# Altium footprint library 1.31-LED发光二极管.PcbLib: 48 footprints (part 3 of 3)
Each footprint in its own frame and in the unit in brackets; x right, y up, seen from the top. Pads: shape width x height; smd on the part's side, far side on the other; paste and mask are expansions set on the pad; w line width, h text height; cw(c..) or ccw(c..) is an arc to the next point about the centre after c.
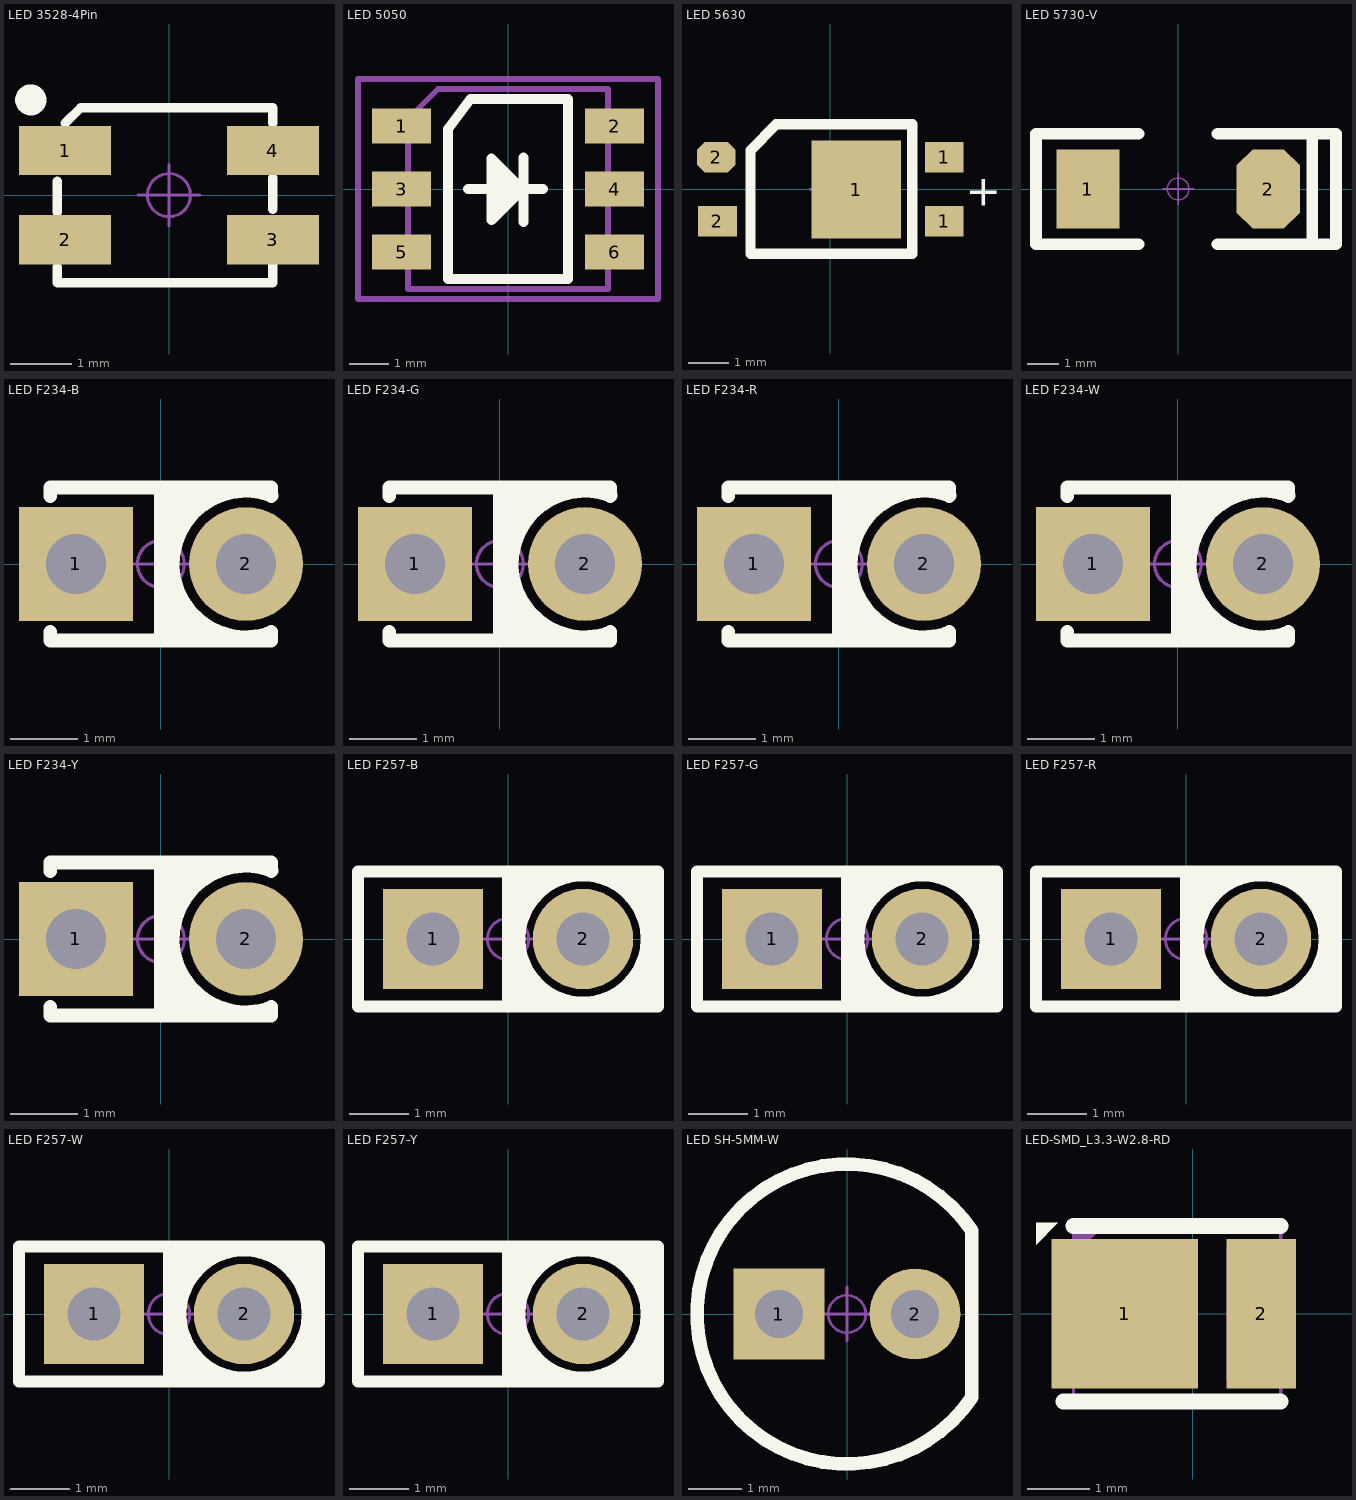
[diagram p2: the footprints below, top view; thin cyan lines are the x and y axes]

## LED 3528-4Pin [mm] "4脚，3528LED                             淘宝ID:黄晶宝石"
pads (4):
  rect 1.5x0.8 smd: 1(-1.689,0.725) 2(-1.689,-0.725) 3(1.689,-0.725) 4(1.689,0.725)
Top Overlay:
  circle w0.254: c-2.248,1.549 r0.127
  lines w0.152: -1.816,-1.168 -1.816,-1.422 1.689,-1.422 1.689,-1.118 ; -1.816,-0.279 -1.816,0.229 ; -1.689,1.168 -1.435,1.422 1.689,1.422 1.689,1.168 ; 1.689,-0.229 1.689,0.279
Mechanical 15:
  circle w0.05: c0,0 r0.35
  lines w0.05: -0.5,0 0.5,0 ; 0,-0.5 0,0.5
3D body "LED 3528 透明胶.ST": height 1.95, standoff 1.2, extent -1.195,-1.195 1.195,1.195
3D body "LED 3528-4Pin 基体.STEP": height 1.95, standoff 0.05, extent -1.75,-1.4 1.75,1.4

## LED 5050 [mm] "白色5050LED                                           淘宝ID:黄晶宝石"
pads (6):
  rect 1.5x0.9 smd: 1(-2.705,1.6) 2(2.705,1.6) 3(-2.705,0) 4(2.705,0) 5(-2.705,-1.6) 6(2.705,-1.6)
Top Overlay:
  lines w0.254: -1.016,0 0.889,0 ; -0.254,0.559 -0.229,-0.432 0.254,0 0,0.254 0,0 0,-0.254 ; 0.356,-0.02 -0.417,-0.792 -0.417,0.775 0.396,-0.038 ; 0.396,-0.841 0.396,0.805 ; -1.524,-2.286 1.524,-2.286 1.524,2.286 -0.953,2.286 -1.524,1.524 -1.524,-2.286
Mechanical 13:
  lines w0.15: -2.54,-2.54 2.54,-2.54 2.54,2.54 -1.778,2.54 -2.54,1.778 -2.54,-2.54
Mechanical 15:
  circle w0.05: c0,0 r0.35
  lines w0.05: -0.5,0 0.5,0 ; 0,-0.5 0,0.5
  lines w0.15: -3.81,-2.794 3.81,-2.794 3.81,2.794 -3.81,2.794 -3.81,-2.794
3D body "LED 5050 基体.STEP": height 1.65, standoff 0.05, extent -2.7,-2.5 2.7,2.5
3D body "LED 5050 透明胶.STEP": height 1.65, standoff 0.77, extent -1.995,-1.995 1.995,1.995

## LED 5630 [mm] "白色5630LED                            淘宝ID:黄晶宝石"
pads (5):
  rect 2.2x2.4 smd: 1(0.635,-0.006)
  rect 0.95x0.75 smd: 1(2.794,-0.781) 1(2.794,0.781) 2(-2.769,-0.781)
  oct 0.95x0.75 smd: 2(-2.794,0.781)
Top Overlay:
  lines w0.254: -1.956,-1.581 2.007,-1.581 2.007,1.594 -1.321,1.594 -1.956,0.959 -1.956,-1.581
  text "+" at 3.327,-0.4 h0.76
Mechanical 15:
  circle w0.05: c0,0 r0.35
  lines w0.05: -0.5,0 0.5,0 ; 0,-0.5 0,0.5
3D body "LED 5630 基体.STEP": height 0.95, standoff 0.05, extent -2.9,-1.5 2.9,1.5
3D body "LED 5630 透明胶.STEP": height 0.95, standoff 0.6, extent -2.395,-1.395 2.395,1.395

## LED 5730-V [mm] "紫色5730LED                               淘宝ID:黄晶宝石"
pads (2):
  rect 2.032x2.54 smd: 1(-2.9,0)
  oct 2.032x2.54 smd: 2(2.9,0)
Top Overlay:
  lines w0.381: -1.27,-1.778 -4.572,-1.778 -4.572,1.778 -1.27,1.778 ; 1.27,-1.778 4.318,-1.778 ; 1.27,1.778 4.318,1.778 4.318,-1.778 ; 4.191,1.778 5.08,1.778 5.08,-1.778 4.318,-1.778
Mechanical 15:
  circle w0.05: c0,0 r0.35
  lines w0.05: -0.5,0 0.5,0 ; 0,-0.5 0,0.5
3D body "LED_UV5730.STEP": height 0.85, standoff 0, extent -2.85,-1.5 2.85,1.5

## LED F234-B [mm] "蓝色2mm*3mm*4mm(长*宽*高)       淘宝ID:黄晶宝石"
pads (2):
  rect 1.7x1.7 hole 0.9: 1(-1.27,0)
  round 1.7 hole 0.9: 2(1.27,0)
Top Overlay:
  lines w0.203: -1.651,-1.016 -1.651,-1.143 1.651,-1.143 1.651,-1.016 ; -1.651,1.016 -1.651,1.143 1.651,1.143 1.651,1.016 ; 0,-1.143 0,1.143 ; 0,-0.889 0.254,-1.143 ; 0,-0.635 0.508,-1.143 ; 0,-0.381 0.762,-1.143 ; 0,0.381 0.762,1.143 ; 0,0.635 0.508,1.143 ; 0,0.889 0.254,1.143 ; 0.127,-0.635 0.127,0.508 ; 1.584,-1.046 cw(c1.27,0) 1.654,1.023
Mechanical 15:
  circle w0.05: c0,0 r0.35
  lines w0.05: -0.5,0 0.5,0 ; 0,-0.5 0,0.5
3D body "LED F234透明罩.STEP": height 4.05, standoff 0.05, extent -1.5,-1 1.5,1
3D body "LED F234-B.STEP": height 3.01, standoff -3.45, extent -1.52,-0.838 1.52,0.838

## LED F234-G [mm] "绿色2mm*3mm*4mm(长*宽*高)           淘宝ID:黄晶宝石"
pads (2):
  rect 1.7x1.7 hole 0.9: 1(-1.27,0)
  round 1.7 hole 0.9: 2(1.27,0)
Top Overlay:
  lines w0.203: -1.651,-1.016 -1.651,-1.143 1.651,-1.143 1.651,-1.016 ; -1.651,1.016 -1.651,1.143 1.651,1.143 1.651,1.016 ; 0,-1.143 0,1.143 ; 0,-0.889 0.254,-1.143 ; 0,-0.635 0.508,-1.143 ; 0,-0.381 0.762,-1.143 ; 0,0.381 0.762,1.143 ; 0,0.635 0.508,1.143 ; 0,0.889 0.254,1.143 ; 0.127,-0.635 0.127,0.508 ; 1.584,-1.046 cw(c1.27,0) 1.654,1.023
Mechanical 15:
  circle w0.05: c0,0 r0.35
  lines w0.05: -0.5,0 0.5,0 ; 0,-0.5 0,0.5
3D body "LED F234透明罩.STEP": height 4.05, standoff 0.05, extent -1.5,-1 1.5,1
3D body "LED F234-G.STEP": height 3.01, standoff -3.45, extent -1.52,-0.838 1.52,0.838

## LED F234-R [mm] "红色2mm*3mm*4mm(长*宽*高)              淘宝ID:黄晶宝石"
pads (2):
  rect 1.7x1.7 hole 0.9: 1(-1.27,0)
  round 1.7 hole 0.9: 2(1.27,0)
Top Overlay:
  lines w0.203: -1.651,-1.016 -1.651,-1.143 1.651,-1.143 1.651,-1.016 ; -1.651,1.016 -1.651,1.143 1.651,1.143 1.651,1.016 ; 0,-1.143 0,1.143 ; 0,-0.889 0.254,-1.143 ; 0,-0.635 0.508,-1.143 ; 0,-0.381 0.762,-1.143 ; 0,0.381 0.762,1.143 ; 0,0.635 0.508,1.143 ; 0,0.889 0.254,1.143 ; 0.127,-0.635 0.127,0.508 ; 1.584,-1.046 cw(c1.27,0) 1.654,1.023
Mechanical 15:
  circle w0.05: c0,0 r0.35
  lines w0.05: -0.5,0 0.5,0 ; 0,-0.5 0,0.5
3D body "LED F234-R.STEP": height 3.01, standoff -3.45, extent -1.52,-0.838 1.52,0.839
3D body "LED F234透明罩.STEP": height 4.05, standoff 0.05, extent -1.5,-1 1.5,1

## LED F234-W [mm] "透明色2mm*3mm*4mm(长*宽*高)              淘宝ID:黄晶宝石"
pads (2):
  rect 1.7x1.7 hole 0.9: 1(-1.27,0)
  round 1.7 hole 0.9: 2(1.27,0)
Top Overlay:
  lines w0.203: -1.651,-1.016 -1.651,-1.143 1.651,-1.143 1.651,-1.016 ; -1.651,1.016 -1.651,1.143 1.651,1.143 1.651,1.016 ; 0,-1.143 0,1.143 ; 0,-0.889 0.254,-1.143 ; 0,-0.635 0.508,-1.143 ; 0,-0.381 0.762,-1.143 ; 0,0.381 0.762,1.143 ; 0,0.635 0.508,1.143 ; 0,0.889 0.254,1.143 ; 0.127,-0.635 0.127,0.508 ; 1.584,-1.046 cw(c1.27,0) 1.654,1.023
Mechanical 15:
  circle w0.05: c0,0 r0.35
  lines w0.05: -0.5,0 0.5,0 ; 0,-0.5 0,0.5
3D body "LED F234-W.STEP": height 3.01, standoff -3.45, extent -1.52,-0.838 1.52,0.838
3D body "LED F234透明罩.STEP": height 4.05, standoff 0.05, extent -1.5,-1 1.5,1

## LED F234-Y [mm] "黄色2mm*3mm*4mm(长*宽*高)                 淘宝ID:黄晶宝石"
pads (2):
  rect 1.7x1.7 hole 0.9: 1(-1.27,0)
  round 1.7 hole 0.9: 2(1.27,0)
Top Overlay:
  lines w0.203: -1.651,-1.016 -1.651,-1.143 1.651,-1.143 1.651,-1.016 ; -1.651,1.016 -1.651,1.143 1.651,1.143 1.651,1.016 ; 0,-1.143 0,1.143 ; 0,-0.889 0.254,-1.143 ; 0,-0.635 0.508,-1.143 ; 0,-0.381 0.762,-1.143 ; 0,0.381 0.762,1.143 ; 0,0.635 0.508,1.143 ; 0,0.889 0.254,1.143 ; 0.127,-0.635 0.127,0.508 ; 1.584,-1.046 cw(c1.27,0) 1.654,1.023
Mechanical 15:
  circle w0.05: c0,0 r0.35
  lines w0.05: -0.5,0 0.5,0 ; 0,-0.5 0,0.5
3D body "LED F234-Y.STEP": height 3.01, standoff -3.45, extent -1.52,-0.838 1.52,0.838
3D body "LED F234透明罩.STEP": height 4.05, standoff 0.05, extent -1.5,-1 1.5,1

## LED F257-B [mm] "蓝色2mm*5mm*7mm(长*宽*高)              淘宝ID:黄晶宝石"
pads (2):
  rect 1.7x1.7 hole 0.9: 1(-1.27,0)
  round 1.7 hole 0.9: 2(1.27,0)
Top Overlay:
  circle w0.203: c1.27,0 r1.078
  lines w0.203: 0,-1.143 0,1.143 ; 0,-0.889 0.254,-1.143 ; 0,-0.635 0.508,-1.143 ; 0,-0.381 0.635,-1.016 0.762,-1.143 ; 0,0.381 0.762,1.143 ; 0,0.635 0.508,1.143 ; 0,0.762 0,0.889 0.254,1.143 ; 0.127,-0.635 0.127,0.508 ; 1.778,-1.143 2.54,-0.381 ; 1.905,1.143 1.778,1.143 2.54,0.381 ; 2.032,-1.143 2.54,-0.635 ; 2.032,1.143 2.54,0.635 ; 2.286,-1.143 2.54,-0.889 ; 2.286,1.143 2.54,0.889 ; 2.413,-0.508 2.413,0.508 ; -2.54,-1.143 2.54,-1.143 2.54,1.143 -2.54,1.143 -2.54,-1.143
Mechanical 15:
  circle w0.05: c0,0 r0.35
  lines w0.05: -0.5,0 0.5,0 ; 0,-0.5 0,0.5
3D body "LED F234-B.STEP": height 3.01, standoff -3.45, extent -1.52,-0.838 1.52,0.838
3D body "LED F257透明罩.STEP": height 7.05, standoff 0.05, extent -2.5,-1 2.5,1

## LED F257-G [mm] "绿色2mm*5mm*7mm(长*宽*高)                  淘宝ID:黄晶宝石"
pads (2):
  rect 1.7x1.7 hole 0.9: 1(-1.27,0)
  round 1.7 hole 0.9: 2(1.27,0)
Top Overlay:
  circle w0.203: c1.27,0 r1.078
  lines w0.203: 0,-1.143 0,1.143 ; 0,-0.889 0.254,-1.143 ; 0,-0.635 0.508,-1.143 ; 0,-0.381 0.635,-1.016 0.762,-1.143 ; 0,0.381 0.762,1.143 ; 0,0.635 0.508,1.143 ; 0,0.762 0,0.889 0.254,1.143 ; 0.127,-0.635 0.127,0.508 ; 1.778,-1.143 2.54,-0.381 ; 1.905,1.143 1.778,1.143 2.54,0.381 ; 2.032,-1.143 2.54,-0.635 ; 2.032,1.143 2.54,0.635 ; 2.286,-1.143 2.54,-0.889 ; 2.286,1.143 2.54,0.889 ; 2.413,-0.508 2.413,0.508 ; -2.54,-1.143 -2.54,1.143 2.54,1.143 2.54,-1.143 -2.54,-1.143
Mechanical 15:
  circle w0.05: c0,0 r0.35
  lines w0.05: -0.5,0 0.5,0 ; 0,-0.5 0,0.5
3D body "LED F234-G.STEP": height 3.01, standoff -3.45, extent -1.52,-0.838 1.52,0.838
3D body "LED F257透明罩.STEP": height 7.05, standoff 0.05, extent -2.5,-1 2.5,1

## LED F257-R [mm] "红色2mm*5mm*7mm(长*宽*高)                 淘宝ID:黄晶宝石"
pads (2):
  rect 1.7x1.7 hole 0.9: 1(-1.27,0)
  round 1.7 hole 0.9: 2(1.27,0)
Top Overlay:
  circle w0.203: c1.27,0 r1.078
  lines w0.203: 0,-1.143 0,1.143 ; 0,-0.889 0.254,-1.143 ; 0,-0.635 0.508,-1.143 ; 0,-0.381 0.635,-1.016 0.762,-1.143 ; 0,0.381 0.762,1.143 ; 0,0.635 0.508,1.143 ; 0,0.762 0,0.889 0.254,1.143 ; 0.127,-0.635 0.127,0.508 ; 1.778,-1.143 2.54,-0.381 ; 1.905,1.143 1.778,1.143 2.54,0.381 ; 2.032,-1.143 2.54,-0.635 ; 2.032,1.143 2.54,0.635 ; 2.286,-1.143 2.54,-0.889 ; 2.286,1.143 2.54,0.889 ; 2.413,-0.508 2.413,0.508 ; -2.54,-1.143 2.54,-1.143 2.54,1.143 -2.54,1.143 -2.54,-1.143
Mechanical 15:
  circle w0.05: c0,0 r0.35
  lines w0.05: -0.5,0 0.5,0 ; 0,-0.5 0,0.5
3D body "LED F257透明罩.STEP": height 7.05, standoff 0.05, extent -2.5,-1 2.5,1
3D body "LED F234-R.STEP": height 3.01, standoff -3.45, extent -1.52,-0.838 1.52,0.839

## LED F257-W [mm] "透明色2mm*5mm*7mm(长*宽*高)               淘宝ID:黄晶宝石"
pads (2):
  rect 1.7x1.7 hole 0.9: 1(-1.27,0)
  round 1.7 hole 0.9: 2(1.27,0)
Top Overlay:
  circle w0.203: c1.27,0 r1.078
  lines w0.203: 0,-1.143 0,1.143 ; 0,-0.889 0.254,-1.143 ; 0,-0.635 0.508,-1.143 ; 0,-0.381 0.635,-1.016 0.762,-1.143 ; 0,0.381 0.762,1.143 ; 0,0.635 0.508,1.143 ; 0,0.762 0,0.889 0.254,1.143 ; 0.127,-0.635 0.127,0.508 ; 1.778,-1.143 2.54,-0.381 ; 1.905,1.143 1.778,1.143 2.54,0.381 ; 2.032,-1.143 2.54,-0.635 ; 2.032,1.143 2.54,0.635 ; 2.286,-1.143 2.54,-0.889 ; 2.286,1.143 2.54,0.889 ; 2.413,-0.508 2.413,0.508 ; -2.54,-1.143 2.54,-1.143 2.54,1.143 -2.54,1.143 -2.54,-1.143
Mechanical 15:
  circle w0.05: c0,0 r0.35
  lines w0.05: -0.5,0 0.5,0 ; 0,-0.5 0,0.5
3D body "LED F234-W.STEP": height 3.01, standoff -3.45, extent -1.52,-0.838 1.52,0.838
3D body "LED F257透明罩.STEP": height 7.05, standoff 0.05, extent -2.5,-1 2.5,1

## LED F257-Y [mm] "黄色2mm*5mm*7mm(长*宽*高)                   淘宝ID:黄晶宝石"
pads (2):
  rect 1.7x1.7 hole 0.9: 1(-1.27,0)
  round 1.7 hole 0.9: 2(1.27,0)
Top Overlay:
  circle w0.203: c1.27,0 r1.078
  lines w0.203: 0,-1.143 0,1.143 ; 0,-0.889 0.254,-1.143 ; 0,-0.635 0.508,-1.143 ; 0,-0.381 0.635,-1.016 0.762,-1.143 ; 0,0.381 0.762,1.143 ; 0,0.635 0.508,1.143 ; 0,0.762 0,0.889 0.254,1.143 ; 0.127,-0.635 0.127,0.508 ; 1.778,-1.143 2.54,-0.381 ; 1.905,1.143 1.778,1.143 2.54,0.381 ; 2.032,-1.143 2.54,-0.635 ; 2.032,1.143 2.54,0.635 ; 2.286,-1.143 2.54,-0.889 ; 2.286,1.143 2.54,0.889 ; 2.413,-0.508 2.413,0.508 ; -2.54,-1.143 2.54,-1.143 2.54,1.143 -2.54,1.143 -2.54,-1.143
Mechanical 15:
  circle w0.05: c0,0 r0.35
  lines w0.05: -0.5,0 0.5,0 ; 0,-0.5 0,0.5
3D body "LED F257透明罩.STEP": height 7.05, standoff 0.05, extent -2.5,-1 2.5,1
3D body "LED F234-Y.STEP": height 3.01, standoff -3.45, extent -1.52,-0.838 1.52,0.838

## LED SH-5MM-W [mm] "白色5mm草帽，直插LED                         淘宝ID:黄晶宝石"
height 10.16
pads (2):
  rect 1.7x1.7 hole 0.9: 1(-1.27,0)
  round 1.7 hole 0.9: 2(1.27,0)
Top Overlay:
  lines w0.254: 2.33,-1.553 cw(c0,0) 2.33,1.553 2.33,-1.553
Mechanical 15:
  circle w0.05: c0,0 r0.35
  lines w0.05: -0.5,0 0.5,0 ; 0,-0.5 0,0.5
3D body "LED-4.8mm玻璃罩.STEP": height 4.85, standoff 0.05, extent -2.75,-2.75 2.41,2.75
3D body "LED-4.8mm.STEP": height 3.42, standoff -3.45, extent -1.584,-0.745 1.535,0.755

## LED-SMD_L3.3-W2.8-RD [mm]
pads (2):
  rect 2.33x2.38 smd paste+0.051: 1(-1.088,0)
  rect 1.1x2.38 smd paste+0.051: 2(1.088,0)
Top Overlay:
  region: -2.5,1.1 -2.5,1.45 -2.15,1.45
  lines w0.254: -2.065,-1.397 -1.905,-1.397 1.397,-1.397 ; -1.905,1.397 -1.885,1.397 1.397,1.397
Mechanical 2:
  region: -1.4,1.4 -1.9,1.4 -1.9,0.95
  region: 1.569,-0.15 0.631,-0.15 0.631,0.15 1.569,0.15
  region: -1.975,0.1 -0.925,0.1 -0.925,-0.1 -1.975,-0.1
  region: 0.969,-0.45 0.969,0.487 1.269,0.487 1.269,-0.45
Mechanical 6:
  lines w0.051: -1.903,-1.4 1.397,-1.4 1.397,1.4 -1.903,1.4 -1.903,-1.4
Mechanical 8:
  region: -1.942,-1.4 -1.942,-1.425 -1.977,-1.46 -2.027,-1.46 -2.062,-1.425 -2.062,-1.4 -2.062,-1.375 -2.027,-1.34 -1.977,-1.34 -1.942,-1.375 -1.942,-1.4
Mechanical 9:
  region: 1.498,-1.05 0.538,-1.05 0.538,1.05 1.498,1.05
  region: -0.022,-1.05 -2.002,-1.05 -2.002,1.05 -0.022,1.05
3D body "LED 1206-Y.STEP": height 0.9, standoff 0, extent -1.982,-0.801 1.22,0.801